# Altium footprint library Contatos.PcbLib: 4 footprints
Each footprint in its own frame and in the unit in brackets; x right, y up, seen from the top. Pads: shape width x height; smd on the part's side, far side on the other; paste and mask are expansions set on the pad; w line width, h text height; cw(c..) or ccw(c..) is an arc to the next point about the centre after c.
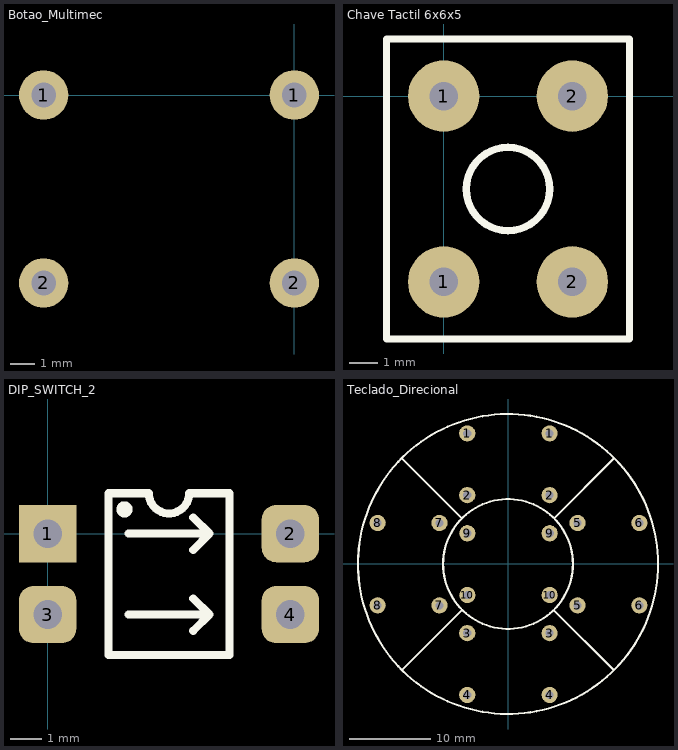
[diagram p0: the footprints below, top view; thin cyan lines are the x and y axes]

## Botao_Multimec [mm]
pads (4):
  round 2 hole 1: 1(-10.16,0) 1(0,0) 2(-10.16,-7.62) 2(0,-7.62)
3D body "Push.STEP": height 13.9, standoff -2.9, extent -10.625,-9.35 0.375,1.65

## Chave Tactil 6x6x5 [mm]
pads (4):
  round 2.5 hole 1: 1(0,-6.5) 1(0,0) 2(4.5,-6.5) 2(4.5,0)
Top Overlay:
  circle w0.254: c2.25,-3.25 r1.458
  lines w0.254: -2,-8.5 -2,2 6.5,2 6.5,-8.5 -2,-8.5
3D body "Chave Tactil.STEP": height 5.51, standoff -2.99, extent -0.85,-7.275 5.35,0.625

## DIP_SWITCH_2 [mm] "DIP Switches / SIP Switches Dip switch Slide Type"
pads (4):
  rect 1.8x1.8 hole 0.9: 1(0,0)
  rrect50% 1.8x1.8 hole 0.9: 2(7.62,0) 3(0,-2.54) 4(7.62,-2.54)
Top Overlay:
  circle w0.254: c2.413,0.762 r0.127
  lines w0.254: 2.54,-2.54 5.08,-2.54 ; 2.54,0 5.08,0 ; 4.572,-3.048 5.08,-2.54 ; 4.572,-2.032 5.08,-2.54 ; 4.572,-0.508 5.08,0 ; 4.572,0.508 5.08,0 ; 1.905,-3.81 5.715,-3.81 5.715,1.27 4.445,1.27 cw(c3.81,1.27) 3.175,1.27 1.905,1.27 1.905,-3.81
3D body "DIP_SWITCH.STEP": height 6, standoff -3, extent -0.294,-4.82 7.914,2.28

## Teclado_Direcional [mm]
pads (20):
  round 2 hole 1: 1(-5.029,16.108) 1(5.131,16.108) 2(-5.029,8.488) 2(5.131,8.488) 3(-5.029,-8.53) 3(5.131,-8.53) 4(-5.029,-16.15) 4(5.131,-16.15) 5(8.576,-5.101) 5(8.576,5.059) 6(16.196,-5.101) 6(16.196,5.059) 7(-8.458,-5.101) 7(-8.458,5.059) 8(-16.078,-5.101) 8(-16.078,5.059) 9(-5.021,3.789) 9(5.139,3.789) 10(-5.021,-3.831) 10(5.139,-3.831)
Top Overlay:
  circle w0.254: c-0.004,-0.001 r8
  circle w0.254: c-0.004,-0.001 r18.5
  lines w0.254: -13.114,13.024 -5.669,5.599 ; -13.064,-13.051 -5.644,-5.651 ; 5.646,-5.686 13.071,-13.091 ; 5.686,5.649 13.066,13.029
3D body "botão_curva2.STEP": height 10.12, standoff -2.9, extent -11.494,6.758 12.006,18.703
3D body "botão_curva2.STEP": height 10.12, standoff -2.9, extent -11.994,-18.824 11.506,-6.88
3D body "botão_curva2.STEP": height 10.12, standoff -2.9, extent 6.926,-12.066 18.87,11.434
3D body "botao_voltar.STEP": height 11.1, standoff -2.9, extent -6.985,-7.06 7.013,6.938
3D body "botão_curva2.STEP": height 10.12, standoff -2.9, extent -18.752,-11.476 -6.808,12.024